# Altium footprint library Mechanical.PcbLib: 49 footprints (part 3 of 4)
Each footprint in its own frame and in the unit in brackets; x right, y up, seen from the top. Pads: shape width x height; smd on the part's side, far side on the other; paste and mask are expansions set on the pad; w line width, h text height; cw(c..) or ccw(c..) is an arc to the next point about the centre after c.
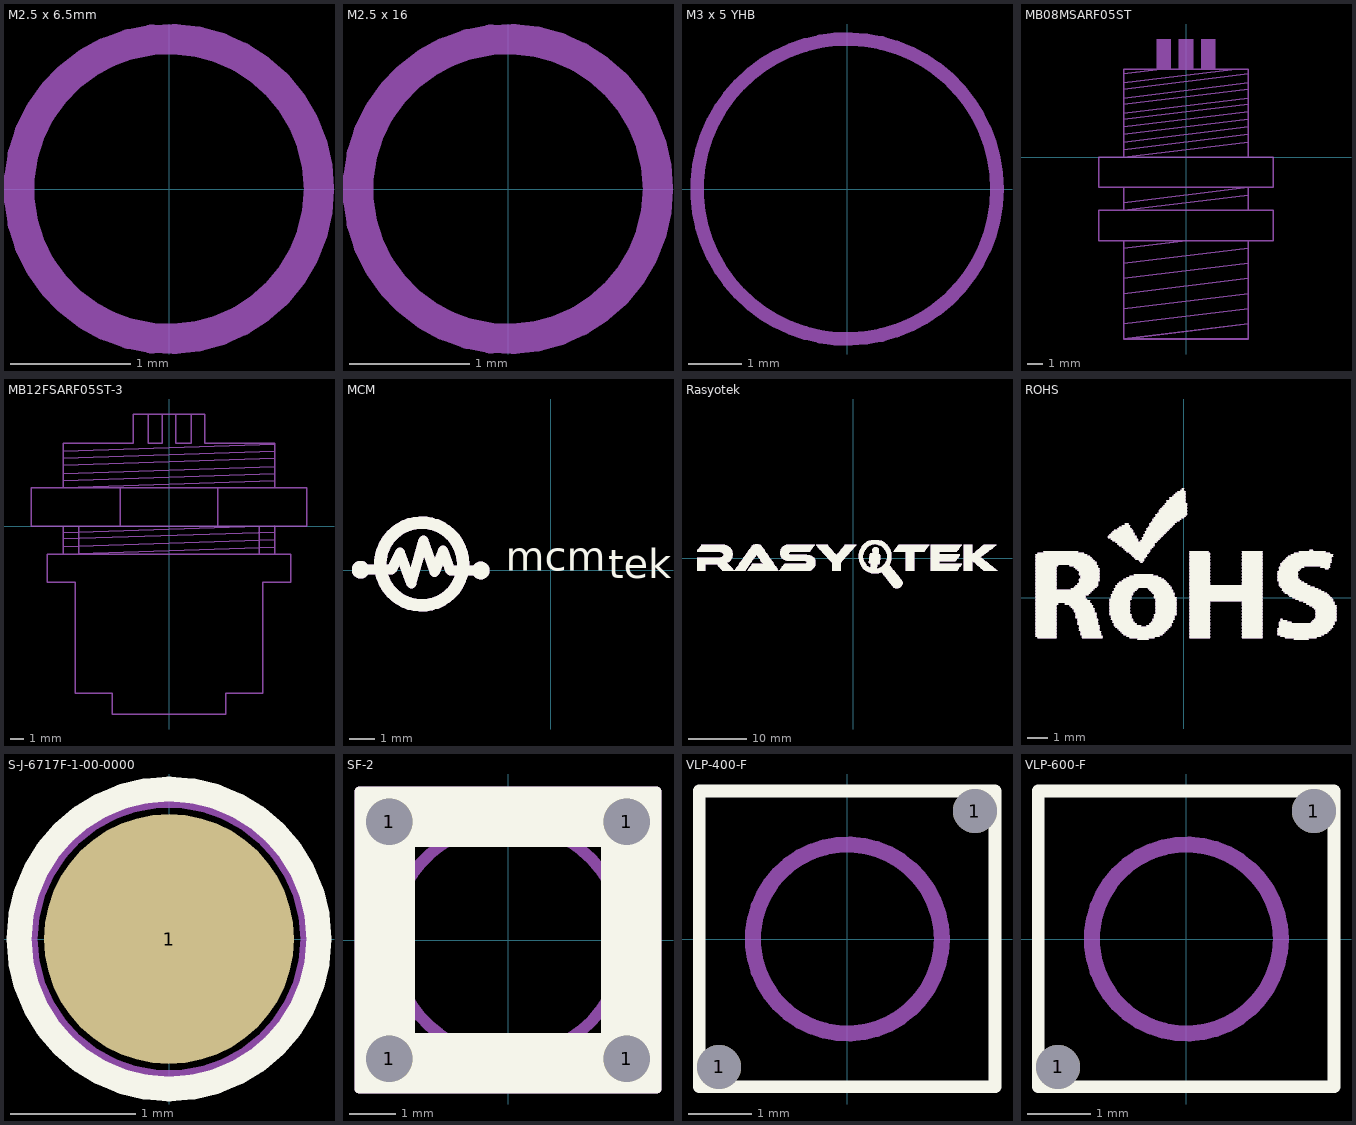
[diagram p2: the footprints below, top view; thin cyan lines are the x and y axes]

## M2.5 x 6.5mm [mm]
Bottom Designator:
  circle w0.254: c0,0 r1.25
3D body "M2.5 v1.step": height 8.5, standoff 0, extent -2.49,-2.42 2.51,2.58

## M2.5 x 11mm Spacer [mm]
3D body "M2_5_11mmSpacer_Brass_971110155 (rev1).stp": height -1.6, standoff -18.6, extent -2.887,-2.5 2.887,2.5

## M2.5 x 16 [mm]
Bottom Designator:
  circle w0.254: c0,0 r1.25
3D body "M2.5x16 v1.step": height 14.2, standoff -3.8, extent -2.477,-2.565 2.523,2.433

## M3 x 5 YHB [mm]
Bottom Designator:
  circle w0.254: c0,0 r2.802
3D body "User Library-M3x0_5xL Phillips Panhead Screw.step": height 2.39, standoff -4.99, extent -2.8,-2.789 2.8,2.789

## M3 x 5mm Spacer [mm]
3D body "Download_STEP_971050354 (rev1).stp": height -2.6, standoff -15.6, extent -2.887,-2.5 2.887,2.5

## M3 x 25mm Spacer [mm]
3D body "M3x25mm Spacer_Brass.stp": height -1.6, standoff -34.6, extent -3.175,-2.75 3.175,2.75

## MB08MSARF05ST [mm] "M08 5 pin Panel Mount"
Mechanical 500:
  rectangle: -1.95,5.8 -1,7.8
  rectangle: -0.5,5.8 0.5,7.8
  rectangle: 1,5.8 1.95,7.8
  lines w0.1: -4.1,-11 4.1,-10 ; -4.1,-10 4.1,-9 ; -4.1,-9 4.1,-8 ; -4.1,-8 4.1,-7 ; -4.1,-7 4.1,-6 ; -4.1,-6 0,-5.5 ; -4.1,-5.5 -4.1,-12 ; -4.1,-3 4.1,-2 ; -4.1,0.5 4.1,1.5 ; -4.1,1 4.1,2 ; -4.1,1.5 4.1,2.5 ; -4.1,2 4.1,3 ; -4.1,2.5 4.1,3.5 ; -4.1,2.9 4.1,3.9 ; -4.1,3.5 4.1,4.5 ; -4.1,3.9 4.1,4.9 ; -4.1,4.5 4.1,5.5 ; -4.1,4.9 3.029,5.769 ; -4.1,5.5 -1.946,5.762 ; -3.641,-2 -5.774,-2 -5.774,0 -3.641,0 ; 4.1,-11 -4.1,-12 ; 4.1,-5.5 4.1,-12 0,-12 -4.1,-12 ; 4.1,-2.5 -4.1,-3.5 ; 4.1,1 -4.1,0 ; 4.33,-2 -4.1,-2 -4.1,-3.5 ; -4.1,-3.5 0,-3.5 ; -4.1,0 4.1,0 ; -4.1,0 -4.1,5.8 -1.95,5.8 1.95,5.8 4.1,5.8 4.1,0 ; 0,-3.5 -5.774,-3.5 -5.774,-5.5 5.774,-5.5 5.774,-3.5 0,-3.5 ; 0,-3.5 4.1,-3.5 4.1,-2 ; 4.1,-2 5.774,-2 5.774,0 4.1,0
3D body "P71_1 MB08MSARF04ST.STEP": height 5, standoff -5, extent -5.774,-12 5.774,7.8

## MB12FSARF05ST-3 [mm]
Mechanical 15:
  lines w0.1: -6.5,-2 -8.755,-2 -8.755,-4 -6.75,-4 -6.75,-12 -4.1,-12 -4.1,-13.5 0,-13.5 4.1,-13.5 4.1,-12 6.75,-12 6.75,-4 8.755,-4 8.755,-2 6.5,-2 ; -6.5,-2 -6.5,-2 ; -6.5,-2 -6.5,0 -9.9,0 -9.9,2.8 -7.6,2.8 -7.6,6 -2.568,6 -2.568,6.9 -2.568,8.1 0,8.1 2.568,8.1 2.568,6.9 2.568,6 7.6,6 7.6,2.8 9.9,2.8 9.9,0 6.5,0 6.5,-2 ; 6.5,-2 6.5,-2
Mechanical 500:
  lines w0.1: -7.6,-1.45 7.6,-0.947 ; -7.6,-0.45 7.6,0.053 ; -7.6,3.303 7.6,3.805 ; -7.6,3.805 7.6,4.308 ; -7.6,4.4 7.6,4.903 ; -7.6,4.903 7.6,5.405 ; -7.6,5.405 7.6,5.908 ; -6.5,0 -9.9,0 -9.9,2.8 -7.6,2.8 ; -3.513,0 -3.508,0 -3.508,2.8 ; 3.508,0 3.508,2.8 ; 6.5,0 9.9,0 9.9,2.8 7.6,2.8 ; 7.6,-2 7.6,0 -7.6,0 -7.6,-0.9 ; 7.6,-1.497 -7.6,-2 ; 7.6,-0.397 -7.6,-0.9 ; 7.6,3.303 -7.6,2.8 ; -7.6,-2 -7.6,-0.9 ; -7.6,-2 -6.5,-2 ; -7.6,2.8 -7.6,6 -2.568,6 -2.568,6.9 -2.568,8.1 -1.5,8.1 -1.5,6 -0.5,6 -0.5,8.1 0.5,8.1 0.5,6 1.606,6 1.606,8.1 2.568,8.1 2.568,6.9 2.568,6 7.6,6 7.6,2.8 ; -7.6,2.8 7.6,2.8 ; -6.5,-2 -8.755,-2 -8.755,-4 -6.75,-4 -6.75,-12 -4.1,-12 -4.1,-13.5 0,-13.5 4.1,-13.5 4.1,-12 6.75,-12 6.75,-4 8.755,-4 8.755,-2 6.5,-2 -6.5,-2 ; -6.5,-2 -6.5,-2
3D body "3D P249_2 MB12FSARHD05ST.STEP": height 9, standoff -9, extent -9.895,-13.5 9.895,8.1

## MCM [mm]
Top Overlay:
  circle w0.5: c-5.175,0.25 r1.659
  circle w0.5: c-7.625,0.023 r0.105
  circle w0.5: c-2.803,-0.009 r0.105
  lines w0.051: -4.978,0.379 -4.013,0.379 ; -3.708,0.125 -3.302,0.125
  lines w0.4: -7.625,0.023 -6.378,0.023 -6.053,0.716 -5.588,-0.534 -5.103,1.192 -4.653,-0.078 -4.318,0.785 -4.028,-0.009 -2.803,-0.009
  text "mcm" at -1.8,-0.4 h2
  text "teknoloji" at 2.3,-0.7 h2
Top Assembly:
  circle w0.5: c-5.175,0.25 r1.659
  circle w0.5: c-7.625,0.023 r0.105
  circle w0.5: c-2.803,-0.009 r0.105
  lines w0.051: -4.978,0.379 -4.013,0.379 ; -3.708,0.125 -3.302,0.125
  lines w0.4: -7.625,0.023 -6.378,0.023 -6.053,0.716 -5.588,-0.534 -5.103,1.192 -4.653,-0.078 -4.318,0.785 -4.028,-0.009 -2.803,-0.009
  text "mcm" at -1.8,-0.4 h2
  text "teknoloji" at 2.3,-0.7 h2

## PCB [mm]
Top Overlay:
  text ".pProjectCode-.pPBACode-.pPBARevision" at -54.982,-1 h3

## Rasyotek [mm]
Top Overlay:
  drawing of 786 lines, arcs and shapes, not listed
Top Assembly:
  drawing of 786 lines, arcs and shapes, not listed

## ROHS [mm]
Top Overlay:
  drawing of 392 lines, arcs and shapes, not listed
Top Assembly:
  drawing of 392 lines, arcs and shapes, not listed

## S-J-6717F-1-00-0000 [mm]
pads (1):
  round 2 smd paste-2539.97: 1(0,0)
Top Overlay:
  circle w0.2: c0,0 r1.2
Top Assembly:
  circle w0.1: c0,0 r1.1
  text ".Designator" at -1,-0.067 h0.2
Mechanical 15:
  lines w0.05: -0.5,0 0.5,0 ; 0,-0.5 0,0.5
3D body "DeckPogo v1.step": height 6.59, standoff -0.49, extent -0.996,-1 0.996,1

## SF-2 [mm]
pads (4):
  round 1 hole 1 unplated: 1(-2.55,-2.55) 1(-2.55,2.55) 1(2.55,-2.55) 1(2.55,2.55)
Top Overlay:
  rectangle: -3.2,-3 -2,3.2
  rectangle: -3.2,2 3.2,3.2
  rectangle: 2,-3.2 3.2,3.25
  rectangle: -3.2,-3.2 3.2,-2
  lines w0.2: -3.2,-3.2 -3.2,3.2 3.2,3.2 3.2,-3.2 -3.2,-3.2
Top Assembly:
  circle w0.254: c0,0 r2.5
  lines w0.2: -3.2,-3.2 3.2,-3.2 3.2,3.2 -3.2,3.2 -3.2,-3.2
3D body "SF2.STEP": height 2.04, standoff -1.49, extent -3.2,-3.2 3.2,3.2

## VLP-400-F [mm]
pads (2):
  round 0.7 hole 0.7 unplated: 1(-2.038,-2.032) 1(2.026,2.032)
Top Overlay:
  lines w0.2: 2.344,-2.349 2.344,2.35 -2.355,2.35 -2.355,-2.349 2.35,-2.349
Top Assembly:
  circle w0.254: c0,0 r1.5
3D body "VLP-400-F.step": height 10.17, standoff -1.51, extent -2.355,-2.349 2.348,2.35

## VLP-600-F [mm]
pads (2):
  round 0.7 hole 0.7 unplated: 1(-2.038,-2.032) 1(2.026,2.032)
Top Overlay:
  lines w0.2: 2.344,-2.349 2.344,2.35 -2.355,2.35 -2.355,-2.349 2.35,-2.349
Top Assembly:
  circle w0.254: c0,0 r1.5
3D body "VLP-600-F.step": height 15.25, standoff -1.51, extent -2.355,-2.349 2.35,2.35